# Altium schematic symbol library 2019-12-07_07-09-16.SchLib: 2 symbols
Pins are listed as number, name and electrical type; pins without a type are passive.

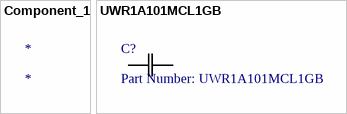
[diagram p0: symbols Component_1 to UWR1A101MCL1GB]

## Component_1
designator *

## UWR1A101MCL1GB
designator C?, comment Part Number: UWR1A101MCL1GB
No Description Available; Vendor: Nichicon; Built_By: EMA_Cory; Type: DEV; Manufacturer_Part_Number: UWR1A101MCL1GB; Copyright: Copyright (C) 2018 Accelerated Designs. All rights reserved; RefDes: RefDes; Value: Value
footprint CAP_UWF_5X5P4
pins: 1, 2